# Altium schematic symbol library PESD2CAN,215.SchLib: 1 symbol
Pins are listed as number, name and electrical type; pins without a type are passive.

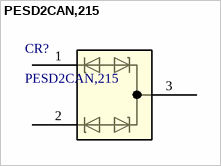
[diagram p0: symbol PESD2CAN,215]

## PESD2CAN,215
designator CR?
Description; Manufacturer_Name: Nexperia; Copyright: Copyright (C) 2026 Ultra Librarian. All rights reserved.; Manufacturer_Part_Number: PESD2CAN,215; RefDes: RefDes; Type: Type
footprint SOT23_TO-236AB_NEX
pins: 1 CATHODE, 2 CATHODE, 3 COMMONCATHODE